# Altium schematic symbol library Logotipos.SchLib: 1 symbol
Pins are listed as number, name and electrical type; pins without a type are passive.

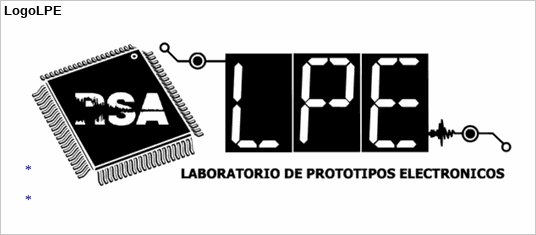
[diagram p0: symbol LogoLPE]

## LogoLPE
designator *
footprint LogoLPE_TOP (Logo del laboratorio de prototipos electronicos)